# Altium footprint library 00318231.PcbLib: 1 footprints
Each footprint in its own frame and in the unit in brackets; x right, y up, seen from the top. Pads: shape width x height; smd on the part's side, far side on the other; paste and mask are expansions set on the pad; w line width, h text height; cw(c..) or ccw(c..) is an arc to the next point about the centre after c.
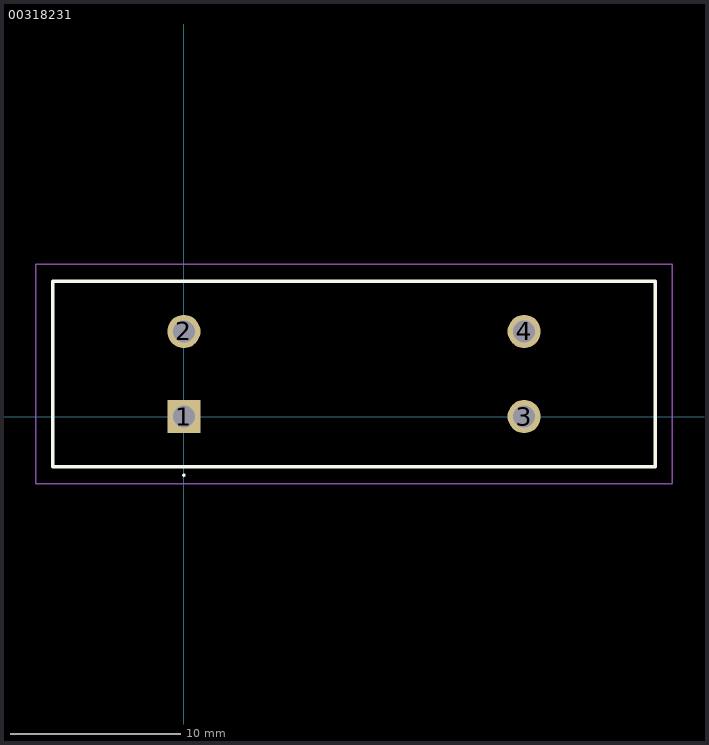
[diagram p0: the footprint, top view; thin cyan lines are the x and y axes]

## 00318231 [mm]
pads (4):
  rect 1.95x1.95 hole 1.3: 1(0,0)
  round 1.95 hole 1.3: 2(0,5) 3(20,0) 4(20,5)
Top Overlay:
  lines w0.1: 0,-3.5 cw(c0,-3.45) 0,-3.4 ; 0,-3.5 0,-3.5 ; 0,-3.5 ccw(c0,-3.45) 0,-3.4 ; 0,-3.4 0,-3.4
  lines w0.2: -7.7,-2.95 27.7,-2.95 27.7,7.95 -7.7,7.95 -7.7,-2.95
Mechanical 15:
  lines w0.1: -7.7,-2.95 27.7,-2.95 27.7,7.95 -7.7,7.95 -7.7,-2.95
Mechanical 20:
  lines w0.1: -8.7,-3.95 28.7,-3.95 28.7,8.95 -8.7,8.95 -8.7,-3.95